# Altium integrated library 3296-W.IntLib: 1 symbol
Pins are listed as number, name and electrical type; pins without a type are passive.

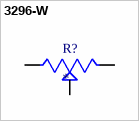
[diagram p0: symbol 3296-W]

## 3296-W
designator R?
Res Cermet Trimmer 2K Ohm 10% 0.5W(1/2W) 25(Elec)Turns 2.19mm (9.53 X 4.83 X 11.55mm) Pin Thru-Hole Tube; MF: Bourns; MP: 3296W; SnapEDA_Link: https://www.snapeda.com/parts/3296W/Bourns/view-part/?ref=snap; Package: NON STANDARD-3 Bourns; Value: *; Check_prices: https://www.snapeda.com/parts/3296W/Bourns/view-part/?ref=eda
footprint TRIM_3296-W
pins: 1 CCW, 2 WIPER, 3 CW